# Altium footprint library Package_DFN_QFN.PcbLib: 735 footprints (part 43 of 46)
Each footprint in its own frame and in the unit in brackets; x right, y up, seen from the top. Pads: shape width x height; smd on the part's side, far side on the other; paste and mask are expansions set on the pad; w line width, h text height; cw(c..) or ccw(c..) is an arc to the next point about the centre after c.
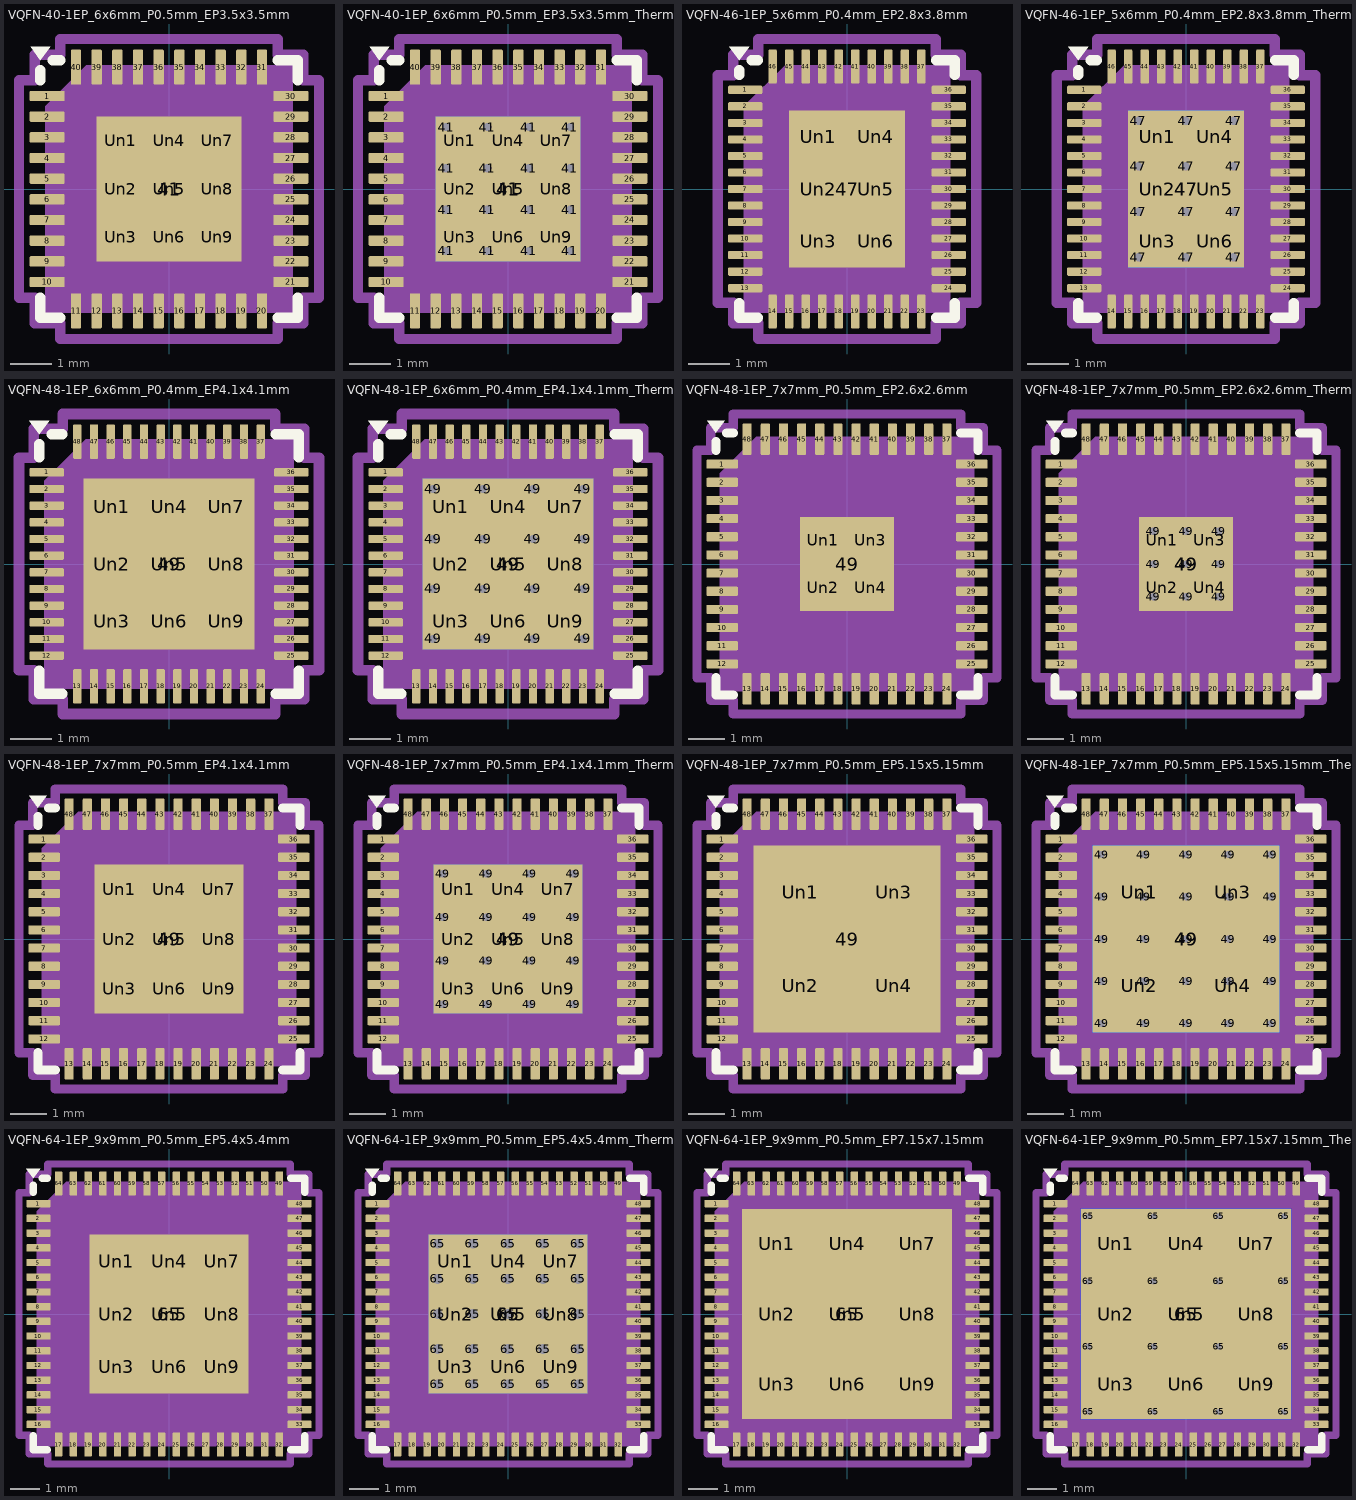
[diagram p42: the footprints below, top view; thin cyan lines are the x and y axes]

## VQFN-40-1EP_6x6mm_P0.5mm_EP3.5x3.5mm [mm] "VQFN-40-1EP_6x6mm_P0.5mm_EP3.5x3.5mm"
pads (50):
  rrect25% 0.85x0.25 smd: 1(-2.95,2.25) 2(-2.95,1.75) 3(-2.95,1.25) 4(-2.95,0.75) 5(-2.95,0.25) 6(-2.95,-0.25) 7(-2.95,-0.75) 8(-2.95,-1.25) 9(-2.95,-1.75) 10(-2.95,-2.25) 21(2.95,-2.25) 22(2.95,-1.75) 23(2.95,-1.25) 24(2.95,-0.75) 25(2.95,-0.25) 26(2.95,0.25) 27(2.95,0.75) 28(2.95,1.25) 29(2.95,1.75) 30(2.95,2.25)
  rrect25% 0.25x0.85 smd: 11(-2.25,-2.95) 12(-1.75,-2.95) 13(-1.25,-2.95) 14(-0.75,-2.95) 15(-0.25,-2.95) 16(0.25,-2.95) 17(0.75,-2.95) 18(1.25,-2.95) 19(1.75,-2.95) 20(2.25,-2.95) 31(2.25,2.95) 32(1.75,2.95) 33(1.25,2.95) 34(0.75,2.95) 35(0.25,2.95) 36(-0.25,2.95) 37(-0.75,2.95) 38(-1.25,2.95) 39(-1.75,2.95) 40(-2.25,2.95)
  rect 3.5x3.5 smd: 41(0,0)
  rrect25% 0.94x0.94 on Top Paste: Un1(-1.17,1.17) Un2(-1.17,0) Un3(-1.17,-1.17) Un4(0,1.17) Un5(0,0) Un6(0,-1.17) Un7(1.17,1.17) Un8(1.17,0) Un9(1.17,-1.17)
F.SilkS:
  region: -3.11,3.11 -3.35,3.44 -2.87,3.44
  lines w0.254: -3.11,-2.635 -3.11,-3.11 -2.635,-3.11 ; -3.11,2.635 -3.11,2.87 ; -2.81,3.11 -2.635,3.11 ; 2.635,-3.11 3.11,-3.11 3.11,-2.635 ; 2.635,3.11 3.11,3.11 3.11,2.635
Top Component Center:
  lines w0.127: -0.127,0 0.127,0 -0.127,0 ; 0,-0.127 0,0.127 0,-0.127
Top Assembly:
  region: 3,-3 -3,-3 -3,2 -2,3 3,3
Top Courtyard:
  lines w0.254: -3.63,-2.63 -3.63,2.63 -3.25,2.63 -3.25,3.25 -2.63,3.25 -2.63,3.63 2.63,3.63 2.63,3.25 3.25,3.25 3.25,2.63 3.63,2.63 3.63,-2.63 3.25,-2.63 3.25,-3.25 2.63,-3.25 2.63,-3.63 -2.63,-3.63 -2.63,-3.25 -3.25,-3.25 -3.25,-2.63 -3.63,-2.63
Top Designator:
  text ".Designator" at -3.43,-0.344 h1.52

## VQFN-40-1EP_6x6mm_P0.5mm_EP3.5x3.5mm_ThermalVias [mm] "VQFN-40-1EP_6x6mm_P0.5mm_EP3.5x3.5mm_ThermalVias"
pads (67):
  rrect25% 0.85x0.25 smd: 1(-2.95,2.25) 2(-2.95,1.75) 3(-2.95,1.25) 4(-2.95,0.75) 5(-2.95,0.25) 6(-2.95,-0.25) 7(-2.95,-0.75) 8(-2.95,-1.25) 9(-2.95,-1.75) 10(-2.95,-2.25) 21(2.95,-2.25) 22(2.95,-1.75) 23(2.95,-1.25) 24(2.95,-0.75) 25(2.95,-0.25) 26(2.95,0.25) 27(2.95,0.75) 28(2.95,1.25) 29(2.95,1.75) 30(2.95,2.25)
  rrect25% 0.25x0.85 smd: 11(-2.25,-2.95) 12(-1.75,-2.95) 13(-1.25,-2.95) 14(-0.75,-2.95) 15(-0.25,-2.95) 16(0.25,-2.95) 17(0.75,-2.95) 18(1.25,-2.95) 19(1.75,-2.95) 20(2.25,-2.95) 31(2.25,2.95) 32(1.75,2.95) 33(1.25,2.95) 34(0.75,2.95) 35(0.25,2.95) 36(-0.25,2.95) 37(-0.75,2.95) 38(-1.25,2.95) 39(-1.75,2.95) 40(-2.25,2.95)
  round 0.5 hole 0.2: 41(-1.5,-1.5) 41(-1.5,-0.5) 41(-1.5,0.5) 41(-1.5,1.5) 41(-0.5,-1.5) 41(-0.5,-0.5) 41(-0.5,0.5) 41(-0.5,1.5) 41(0.5,-1.5) 41(0.5,-0.5) 41(0.5,0.5) 41(0.5,1.5) 41(1.5,-1.5) 41(1.5,-0.5) 41(1.5,0.5) 41(1.5,1.5)
  rect 3.5x3.5 smd: 41(0,0)
  rect 3.5x3.5 smd far side: 41(0,0)
  rrect25% 0.94x0.94 on Top Paste: Un1(-1.17,1.17) Un2(-1.17,0) Un3(-1.17,-1.17) Un4(0,1.17) Un5(0,0) Un6(0,-1.17) Un7(1.17,1.17) Un8(1.17,0) Un9(1.17,-1.17)
F.SilkS:
  region: -3.11,3.11 -3.35,3.44 -2.87,3.44
  lines w0.254: -3.11,-2.635 -3.11,-3.11 -2.635,-3.11 ; -3.11,2.635 -3.11,2.87 ; -2.81,3.11 -2.635,3.11 ; 2.635,-3.11 3.11,-3.11 3.11,-2.635 ; 2.635,3.11 3.11,3.11 3.11,2.635
Top Component Center:
  lines w0.127: -0.127,0 0.127,0 -0.127,0 ; 0,-0.127 0,0.127 0,-0.127
Top Assembly:
  region: 3,-3 -3,-3 -3,2 -2,3 3,3
Top Courtyard:
  lines w0.254: -3.63,-2.63 -3.25,-2.63 -3.25,-3.25 -2.63,-3.25 -2.63,-3.63 2.63,-3.63 2.63,-3.25 3.25,-3.25 3.25,-2.63 3.63,-2.63 3.63,2.63 3.25,2.63 3.25,3.25 2.63,3.25 2.63,3.63 -2.63,3.63 -2.63,3.25 -3.25,3.25 -3.25,2.63 -3.63,2.63 -3.63,-2.63
Top Designator:
  text ".Designator" at -3.43,-0.344 h1.52

## VQFN-46-1EP_5x6mm_P0.4mm_EP2.8x3.8mm [mm] "VQFN-46-1EP_5x6mm_P0.4mm_EP2.8x3.8mm"
pads (53):
  rrect25% 0.825x0.2 smd: 1(-2.462,2.4) 2(-2.462,2) 3(-2.462,1.6) 4(-2.462,1.2) 5(-2.462,0.8) 6(-2.462,0.4) 7(-2.462,0) 8(-2.462,-0.4) 9(-2.462,-0.8) 10(-2.462,-1.2) 11(-2.462,-1.6) 12(-2.462,-2) 13(-2.462,-2.4) 24(2.462,-2.4) 25(2.462,-2) 26(2.462,-1.6) 27(2.462,-1.2) 28(2.462,-0.8) 29(2.462,-0.4) 30(2.462,0) 31(2.462,0.4) 32(2.462,0.8) 33(2.462,1.2) 34(2.462,1.6) 35(2.462,2) 36(2.462,2.4)
  rrect25% 0.2x0.825 smd: 14(-1.8,-2.963) 15(-1.4,-2.963) 16(-1,-2.963) 17(-0.6,-2.963) 18(-0.2,-2.963) 19(0.2,-2.963) 20(0.6,-2.963) 21(1,-2.963) 22(1.4,-2.963) 23(1.8,-2.963) 37(1.8,2.963) 38(1.4,2.963) 39(1,2.963) 40(0.6,2.963) 41(0.2,2.963) 42(-0.2,2.963) 43(-0.6,2.963) 44(-1,2.963) 45(-1.4,2.963) 46(-1.8,2.963)
  rect 2.8x3.8 smd: 47(0,0)
  rrect25% 1.13x1.02 on Top Paste: Un1(-0.7,1.27) Un2(-0.7,0) Un3(-0.7,-1.27) Un4(0.7,1.27) Un5(0.7,0) Un6(0.7,-1.27)
F.SilkS:
  region: -2.61,3.11 -2.85,3.44 -2.37,3.44
  lines w0.254: -2.61,-2.76 -2.61,-3.11 -2.16,-3.11 ; -2.61,2.76 -2.61,2.87 ; -2.31,3.11 -2.16,3.11 ; 2.16,-3.11 2.61,-3.11 2.61,-2.76 ; 2.16,3.11 2.61,3.11 2.61,2.76
Top Component Center:
  lines w0.127: -0.127,0 0.127,0 -0.127,0 ; 0,-0.127 0,0.127 0,-0.127
Top Assembly:
  region: 2.5,-3 -2.5,-3 -2.5,2 -1.5,3 2.5,3
Top Courtyard:
  lines w0.254: -3.13,-2.75 -2.75,-2.75 -2.75,-3.25 -2.15,-3.25 -2.15,-3.63 2.15,-3.63 2.15,-3.25 2.75,-3.25 2.75,-2.75 3.13,-2.75 3.13,2.75 2.75,2.75 2.75,3.25 2.15,3.25 2.15,3.63 -2.15,3.63 -2.15,3.25 -2.75,3.25 -2.75,2.75 -3.13,2.75 -3.13,-2.75
Top Designator:
  text ".Designator" at -3.43,-0.344 h1.52

## VQFN-46-1EP_5x6mm_P0.4mm_EP2.8x3.8mm_ThermalVias [mm] "VQFN-46-1EP_5x6mm_P0.4mm_EP2.8x3.8mm_ThermalVias"
pads (66):
  rrect25% 0.825x0.2 smd: 1(-2.462,2.4) 2(-2.462,2) 3(-2.462,1.6) 4(-2.462,1.2) 5(-2.462,0.8) 6(-2.462,0.4) 7(-2.462,0) 8(-2.462,-0.4) 9(-2.462,-0.8) 10(-2.462,-1.2) 11(-2.462,-1.6) 12(-2.462,-2) 13(-2.462,-2.4) 24(2.462,-2.4) 25(2.462,-2) 26(2.462,-1.6) 27(2.462,-1.2) 28(2.462,-0.8) 29(2.462,-0.4) 30(2.462,0) 31(2.462,0.4) 32(2.462,0.8) 33(2.462,1.2) 34(2.462,1.6) 35(2.462,2) 36(2.462,2.4)
  rrect25% 0.2x0.825 smd: 14(-1.8,-2.963) 15(-1.4,-2.963) 16(-1,-2.963) 17(-0.6,-2.963) 18(-0.2,-2.963) 19(0.2,-2.963) 20(0.6,-2.963) 21(1,-2.963) 22(1.4,-2.963) 23(1.8,-2.963) 37(1.8,2.963) 38(1.4,2.963) 39(1,2.963) 40(0.6,2.963) 41(0.2,2.963) 42(-0.2,2.963) 43(-0.6,2.963) 44(-1,2.963) 45(-1.4,2.963) 46(-1.8,2.963)
  round 0.5 hole 0.2: 47(-1.15,-1.65) 47(-1.15,-0.55) 47(-1.15,0.55) 47(-1.15,1.65) 47(0,-1.65) 47(0,-0.55) 47(0,0.55) 47(0,1.65) 47(1.15,-1.65) 47(1.15,-0.55) 47(1.15,0.55) 47(1.15,1.65)
  rect 2.8x3.8 smd: 47(0,0)
  rect 2.8x3.8 smd far side: 47(0,0)
  rrect23% 1.21x1.1 on Top Paste: Un1(-0.7,1.27) Un2(-0.7,0) Un3(-0.7,-1.27) Un4(0.7,1.27) Un5(0.7,0) Un6(0.7,-1.27)
F.SilkS:
  region: -2.61,3.11 -2.85,3.44 -2.37,3.44
  lines w0.254: -2.61,-2.76 -2.61,-3.11 -2.16,-3.11 ; -2.61,2.76 -2.61,2.87 ; -2.31,3.11 -2.16,3.11 ; 2.16,-3.11 2.61,-3.11 2.61,-2.76 ; 2.16,3.11 2.61,3.11 2.61,2.76
Top Component Center:
  lines w0.127: -0.127,0 0.127,0 -0.127,0 ; 0,-0.127 0,0.127 0,-0.127
Top Assembly:
  region: 2.5,-3 -2.5,-3 -2.5,2 -1.5,3 2.5,3
Top Courtyard:
  lines w0.254: -3.13,-2.75 -2.75,-2.75 -2.75,-3.25 -2.15,-3.25 -2.15,-3.63 2.15,-3.63 2.15,-3.25 2.75,-3.25 2.75,-2.75 3.13,-2.75 3.13,2.75 2.75,2.75 2.75,3.25 2.15,3.25 2.15,3.63 -2.15,3.63 -2.15,3.25 -2.75,3.25 -2.75,2.75 -3.13,2.75 -3.13,-2.75
Top Designator:
  text ".Designator" at -3.43,-0.344 h1.52

## VQFN-48-1EP_6x6mm_P0.4mm_EP4.1x4.1mm [mm] "VQFN-48-1EP_6x6mm_P0.4mm_EP4.1x4.1mm"
pads (58):
  rrect25% 0.825x0.2 smd: 1(-2.937,2.2) 2(-2.937,1.8) 3(-2.937,1.4) 4(-2.937,1) 5(-2.937,0.6) 6(-2.937,0.2) 7(-2.937,-0.2) 8(-2.937,-0.6) 9(-2.937,-1) 10(-2.937,-1.4) 11(-2.937,-1.8) 12(-2.937,-2.2) 25(2.937,-2.2) 26(2.937,-1.8) 27(2.937,-1.4) 28(2.937,-1) 29(2.937,-0.6) 30(2.937,-0.2) 31(2.937,0.2) 32(2.937,0.6) 33(2.937,1) 34(2.937,1.4) 35(2.937,1.8) 36(2.937,2.2)
  rrect25% 0.2x0.825 smd: 13(-2.2,-2.937) 14(-1.8,-2.937) 15(-1.4,-2.937) 16(-1,-2.937) 17(-0.6,-2.937) 18(-0.2,-2.937) 19(0.2,-2.937) 20(0.6,-2.937) 21(1,-2.937) 22(1.4,-2.937) 23(1.8,-2.937) 24(2.2,-2.937) 37(2.2,2.937) 38(1.8,2.937) 39(1.4,2.937) 40(1,2.937) 41(0.6,2.937) 42(0.2,2.937) 43(-0.2,2.937) 44(-0.6,2.937) 45(-1,2.937) 46(-1.4,2.937) 47(-1.8,2.937) 48(-2.2,2.937)
  rect 4.1x4.1 smd: 49(0,0)
  rrect23% 1.1x1.1 on Top Paste: Un1(-1.37,1.37) Un2(-1.37,0) Un3(-1.37,-1.37) Un4(0,1.37) Un5(0,0) Un6(0,-1.37) Un7(1.37,1.37) Un8(1.37,0) Un9(1.37,-1.37)
F.SilkS:
  region: -3.11,3.11 -3.35,3.44 -2.87,3.44
  lines w0.254: -3.11,-2.56 -3.11,-3.11 -2.56,-3.11 ; -3.11,2.56 -3.11,2.87 ; -2.81,3.11 -2.56,3.11 ; 2.56,-3.11 3.11,-3.11 3.11,-2.56 ; 2.56,3.11 3.11,3.11 3.11,2.56
Top Component Center:
  lines w0.127: -0.127,0 0.127,0 -0.127,0 ; 0,-0.127 0,0.127 0,-0.127
Top Assembly:
  region: 3,-3 -3,-3 -3,2 -2,3 3,3
Top Courtyard:
  lines w0.254: -3.6,-2.55 -3.6,2.55 -3.25,2.55 -3.25,3.25 -2.55,3.25 -2.55,3.6 2.55,3.6 2.55,3.25 3.25,3.25 3.25,2.55 3.6,2.55 3.6,-2.55 3.25,-2.55 3.25,-3.25 2.55,-3.25 2.55,-3.6 -2.55,-3.6 -2.55,-3.25 -3.25,-3.25 -3.25,-2.55 -3.6,-2.55
Top Designator:
  text ".Designator" at -3.43,-0.344 h1.52

## VQFN-48-1EP_6x6mm_P0.4mm_EP4.1x4.1mm_ThermalVias [mm] "VQFN-48-1EP_6x6mm_P0.4mm_EP4.1x4.1mm_ThermalVias"
pads (75):
  rrect25% 0.825x0.2 smd: 1(-2.937,2.2) 2(-2.937,1.8) 3(-2.937,1.4) 4(-2.937,1) 5(-2.937,0.6) 6(-2.937,0.2) 7(-2.937,-0.2) 8(-2.937,-0.6) 9(-2.937,-1) 10(-2.937,-1.4) 11(-2.937,-1.8) 12(-2.937,-2.2) 25(2.937,-2.2) 26(2.937,-1.8) 27(2.937,-1.4) 28(2.937,-1) 29(2.937,-0.6) 30(2.937,-0.2) 31(2.937,0.2) 32(2.937,0.6) 33(2.937,1) 34(2.937,1.4) 35(2.937,1.8) 36(2.937,2.2)
  rrect25% 0.2x0.825 smd: 13(-2.2,-2.937) 14(-1.8,-2.937) 15(-1.4,-2.937) 16(-1,-2.937) 17(-0.6,-2.937) 18(-0.2,-2.937) 19(0.2,-2.937) 20(0.6,-2.937) 21(1,-2.937) 22(1.4,-2.937) 23(1.8,-2.937) 24(2.2,-2.937) 37(2.2,2.937) 38(1.8,2.937) 39(1.4,2.937) 40(1,2.937) 41(0.6,2.937) 42(0.2,2.937) 43(-0.2,2.937) 44(-0.6,2.937) 45(-1,2.937) 46(-1.4,2.937) 47(-1.8,2.937) 48(-2.2,2.937)
  round 0.5 hole 0.2: 49(-1.8,-1.8) 49(-1.8,-0.6) 49(-1.8,0.6) 49(-1.8,1.8) 49(-0.6,-1.8) 49(-0.6,-0.6) 49(-0.6,0.6) 49(-0.6,1.8) 49(0.6,-1.8) 49(0.6,-0.6) 49(0.6,0.6) 49(0.6,1.8) 49(1.8,-1.8) 49(1.8,-0.6) 49(1.8,0.6) 49(1.8,1.8)
  rect 4.1x4.1 smd: 49(0,0)
  rect 4.1x4.1 smd far side: 49(0,0)
  rrect23% 1.1x1.1 on Top Paste: Un1(-1.37,1.37) Un2(-1.37,0) Un3(-1.37,-1.37) Un4(0,1.37) Un5(0,0) Un6(0,-1.37) Un7(1.37,1.37) Un8(1.37,0) Un9(1.37,-1.37)
F.SilkS:
  region: -3.11,3.11 -3.35,3.44 -2.87,3.44
  lines w0.254: -3.11,-2.56 -3.11,-3.11 -2.56,-3.11 ; -3.11,2.56 -3.11,2.87 ; -2.81,3.11 -2.56,3.11 ; 2.56,-3.11 3.11,-3.11 3.11,-2.56 ; 2.56,3.11 3.11,3.11 3.11,2.56
Top Component Center:
  lines w0.127: -0.127,0 0.127,0 -0.127,0 ; 0,-0.127 0,0.127 0,-0.127
Top Assembly:
  region: 3,-3 -3,-3 -3,2 -2,3 3,3
Top Courtyard:
  lines w0.254: -3.6,-2.55 -3.25,-2.55 -3.25,-3.25 -2.55,-3.25 -2.55,-3.6 2.55,-3.6 2.55,-3.25 3.25,-3.25 3.25,-2.55 3.6,-2.55 3.6,2.55 3.25,2.55 3.25,3.25 2.55,3.25 2.55,3.6 -2.55,3.6 -2.55,3.25 -3.25,3.25 -3.25,2.55 -3.6,2.55 -3.6,-2.55
Top Designator:
  text ".Designator" at -3.43,-0.344 h1.52

## VQFN-48-1EP_7x7mm_P0.5mm_EP2.6x2.6mm [mm] "VQFN-48-1EP_7x7mm_P0.5mm_EP2.6x2.6mm"
pads (53):
  rrect25% 0.875x0.25 smd: 1(-3.437,2.75) 2(-3.437,2.25) 3(-3.437,1.75) 4(-3.437,1.25) 5(-3.437,0.75) 6(-3.437,0.25) 7(-3.437,-0.25) 8(-3.437,-0.75) 9(-3.437,-1.25) 10(-3.437,-1.75) 11(-3.437,-2.25) 12(-3.437,-2.75) 25(3.437,-2.75) 26(3.437,-2.25) 27(3.437,-1.75) 28(3.437,-1.25) 29(3.437,-0.75) 30(3.437,-0.25) 31(3.437,0.25) 32(3.437,0.75) 33(3.437,1.25) 34(3.437,1.75) 35(3.437,2.25) 36(3.437,2.75)
  rrect25% 0.25x0.875 smd: 13(-2.75,-3.437) 14(-2.25,-3.437) 15(-1.75,-3.437) 16(-1.25,-3.437) 17(-0.75,-3.437) 18(-0.25,-3.437) 19(0.25,-3.437) 20(0.75,-3.437) 21(1.25,-3.437) 22(1.75,-3.437) 23(2.25,-3.437) 24(2.75,-3.437) 37(2.75,3.437) 38(2.25,3.437) 39(1.75,3.437) 40(1.25,3.437) 41(0.75,3.437) 42(0.25,3.437) 43(-0.25,3.437) 44(-0.75,3.437) 45(-1.25,3.437) 46(-1.75,3.437) 47(-2.25,3.437) 48(-2.75,3.437)
  rect 2.6x2.6 smd: 49(0,0)
  rrect24% 1.05x1.05 on Top Paste: Un1(-0.65,0.65) Un2(-0.65,-0.65) Un3(0.65,0.65) Un4(0.65,-0.65)
F.SilkS:
  region: -3.61,3.61 -3.85,3.94 -3.37,3.94
  lines w0.254: -3.61,-3.135 -3.61,-3.61 -3.135,-3.61 ; -3.61,3.135 -3.61,3.37 ; -3.31,3.61 -3.135,3.61 ; 3.135,-3.61 3.61,-3.61 3.61,-3.135 ; 3.135,3.61 3.61,3.61 3.61,3.135
Top Component Center:
  lines w0.127: -0.127,0 0.127,0 -0.127,0 ; 0,-0.127 0,0.127 0,-0.127
Top Assembly:
  region: 3.5,-3.5 -3.5,-3.5 -3.5,2.5 -2.5,3.5 3.5,3.5
Top Courtyard:
  lines w0.254: -4.13,-3.13 -3.75,-3.13 -3.75,-3.75 -3.13,-3.75 -3.13,-4.13 3.13,-4.13 3.13,-3.75 3.75,-3.75 3.75,-3.13 4.13,-3.13 4.13,3.13 3.75,3.13 3.75,3.75 3.13,3.75 3.13,4.13 -3.13,4.13 -3.13,3.75 -3.75,3.75 -3.75,3.13 -4.13,3.13 -4.13,-3.13
Top Designator:
  text ".Designator" at -3.43,-0.344 h1.52
3D body "VQFN-48-1EP_7x7mm_P0.5mm_EP4.1x4.1mm.step": height 1.05, standoff 0, extent -3.5,-3.5 3.5,3.5

## VQFN-48-1EP_7x7mm_P0.5mm_EP2.6x2.6mm_ThermalVias [mm] "VQFN-48-1EP_7x7mm_P0.5mm_EP2.6x2.6mm_ThermalVias"
pads (63):
  rrect25% 0.875x0.25 smd: 1(-3.437,2.75) 2(-3.437,2.25) 3(-3.437,1.75) 4(-3.437,1.25) 5(-3.437,0.75) 6(-3.437,0.25) 7(-3.437,-0.25) 8(-3.437,-0.75) 9(-3.437,-1.25) 10(-3.437,-1.75) 11(-3.437,-2.25) 12(-3.437,-2.75) 25(3.437,-2.75) 26(3.437,-2.25) 27(3.437,-1.75) 28(3.437,-1.25) 29(3.437,-0.75) 30(3.437,-0.25) 31(3.437,0.25) 32(3.437,0.75) 33(3.437,1.25) 34(3.437,1.75) 35(3.437,2.25) 36(3.437,2.75)
  rrect25% 0.25x0.875 smd: 13(-2.75,-3.437) 14(-2.25,-3.437) 15(-1.75,-3.437) 16(-1.25,-3.437) 17(-0.75,-3.437) 18(-0.25,-3.437) 19(0.25,-3.437) 20(0.75,-3.437) 21(1.25,-3.437) 22(1.75,-3.437) 23(2.25,-3.437) 24(2.75,-3.437) 37(2.75,3.437) 38(2.25,3.437) 39(1.75,3.437) 40(1.25,3.437) 41(0.75,3.437) 42(0.25,3.437) 43(-0.25,3.437) 44(-0.75,3.437) 45(-1.25,3.437) 46(-1.75,3.437) 47(-2.25,3.437) 48(-2.75,3.437)
  round 0.5 hole 0.2: 49(-0.9,-0.9) 49(-0.9,0) 49(-0.9,0.9) 49(0,-0.9) 49(0,0) 49(0,0.9) 49(0.9,-0.9) 49(0.9,0) 49(0.9,0.9)
  rect 2.6x2.6 smd: 49(0,0)
  rect 2.3x2.3 smd far side: 49(0,0)
  rrect24% 1.05x1.05 on Top Paste: Un1(-0.65,0.65) Un2(-0.65,-0.65) Un3(0.65,0.65) Un4(0.65,-0.65)
F.SilkS:
  region: -3.61,3.61 -3.85,3.94 -3.37,3.94
  lines w0.254: -3.61,-3.135 -3.61,-3.61 -3.135,-3.61 ; -3.61,3.135 -3.61,3.37 ; -3.31,3.61 -3.135,3.61 ; 3.135,-3.61 3.61,-3.61 3.61,-3.135 ; 3.135,3.61 3.61,3.61 3.61,3.135
Top Component Center:
  lines w0.127: -0.127,0 0.127,0 -0.127,0 ; 0,-0.127 0,0.127 0,-0.127
Top Assembly:
  region: 3.5,-3.5 -3.5,-3.5 -3.5,2.5 -2.5,3.5 3.5,3.5
Top Courtyard:
  lines w0.254: -4.13,-3.13 -3.75,-3.13 -3.75,-3.75 -3.13,-3.75 -3.13,-4.13 3.13,-4.13 3.13,-3.75 3.75,-3.75 3.75,-3.13 4.13,-3.13 4.13,3.13 3.75,3.13 3.75,3.75 3.13,3.75 3.13,4.13 -3.13,4.13 -3.13,3.75 -3.75,3.75 -3.75,3.13 -4.13,3.13 -4.13,-3.13
Top Designator:
  text ".Designator" at -3.43,-0.344 h1.52
3D body "VQFN-48-1EP_7x7mm_P0.5mm_EP4.1x4.1mm.step": height 1.05, standoff 0, extent -3.5,-3.5 3.5,3.5

## VQFN-48-1EP_7x7mm_P0.5mm_EP4.1x4.1mm [mm] "VQFN-48-1EP_7x7mm_P0.5mm_EP4.1x4.1mm"
pads (58):
  rrect25% 0.875x0.25 smd: 1(-3.437,2.75) 2(-3.437,2.25) 3(-3.437,1.75) 4(-3.437,1.25) 5(-3.437,0.75) 6(-3.437,0.25) 7(-3.437,-0.25) 8(-3.437,-0.75) 9(-3.437,-1.25) 10(-3.437,-1.75) 11(-3.437,-2.25) 12(-3.437,-2.75) 25(3.437,-2.75) 26(3.437,-2.25) 27(3.437,-1.75) 28(3.437,-1.25) 29(3.437,-0.75) 30(3.437,-0.25) 31(3.437,0.25) 32(3.437,0.75) 33(3.437,1.25) 34(3.437,1.75) 35(3.437,2.25) 36(3.437,2.75)
  rrect25% 0.25x0.875 smd: 13(-2.75,-3.437) 14(-2.25,-3.437) 15(-1.75,-3.437) 16(-1.25,-3.437) 17(-0.75,-3.437) 18(-0.25,-3.437) 19(0.25,-3.437) 20(0.75,-3.437) 21(1.25,-3.437) 22(1.75,-3.437) 23(2.25,-3.437) 24(2.75,-3.437) 37(2.75,3.437) 38(2.25,3.437) 39(1.75,3.437) 40(1.25,3.437) 41(0.75,3.437) 42(0.25,3.437) 43(-0.25,3.437) 44(-0.75,3.437) 45(-1.25,3.437) 46(-1.75,3.437) 47(-2.25,3.437) 48(-2.75,3.437)
  rect 4.1x4.1 smd: 49(0,0)
  rrect23% 1.1x1.1 on Top Paste: Un1(-1.37,1.37) Un2(-1.37,0) Un3(-1.37,-1.37) Un4(0,1.37) Un5(0,0) Un6(0,-1.37) Un7(1.37,1.37) Un8(1.37,0) Un9(1.37,-1.37)
F.SilkS:
  region: -3.61,3.61 -3.85,3.94 -3.37,3.94
  lines w0.254: -3.61,-3.135 -3.61,-3.61 -3.135,-3.61 ; -3.61,3.135 -3.61,3.37 ; -3.31,3.61 -3.135,3.61 ; 3.135,-3.61 3.61,-3.61 3.61,-3.135 ; 3.135,3.61 3.61,3.61 3.61,3.135
Top Component Center:
  lines w0.127: -0.127,0 0.127,0 -0.127,0 ; 0,-0.127 0,0.127 0,-0.127
Top Assembly:
  region: 3.5,-3.5 -3.5,-3.5 -3.5,2.5 -2.5,3.5 3.5,3.5
Top Courtyard:
  lines w0.254: -4.13,-3.13 -3.75,-3.13 -3.75,-3.75 -3.13,-3.75 -3.13,-4.13 3.13,-4.13 3.13,-3.75 3.75,-3.75 3.75,-3.13 4.13,-3.13 4.13,3.13 3.75,3.13 3.75,3.75 3.13,3.75 3.13,4.13 -3.13,4.13 -3.13,3.75 -3.75,3.75 -3.75,3.13 -4.13,3.13 -4.13,-3.13
Top Designator:
  text ".Designator" at -3.43,-0.344 h1.52
3D body "VQFN-48-1EP_7x7mm_P0.5mm_EP4.1x4.1mm.step": height 1.05, standoff 0, extent -3.5,-3.5 3.5,3.5

## VQFN-48-1EP_7x7mm_P0.5mm_EP4.1x4.1mm_ThermalVias [mm] "VQFN-48-1EP_7x7mm_P0.5mm_EP4.1x4.1mm_ThermalVias"
pads (75):
  rrect25% 0.875x0.25 smd: 1(-3.437,2.75) 2(-3.437,2.25) 3(-3.437,1.75) 4(-3.437,1.25) 5(-3.437,0.75) 6(-3.437,0.25) 7(-3.437,-0.25) 8(-3.437,-0.75) 9(-3.437,-1.25) 10(-3.437,-1.75) 11(-3.437,-2.25) 12(-3.437,-2.75) 25(3.437,-2.75) 26(3.437,-2.25) 27(3.437,-1.75) 28(3.437,-1.25) 29(3.437,-0.75) 30(3.437,-0.25) 31(3.437,0.25) 32(3.437,0.75) 33(3.437,1.25) 34(3.437,1.75) 35(3.437,2.25) 36(3.437,2.75)
  rrect25% 0.25x0.875 smd: 13(-2.75,-3.437) 14(-2.25,-3.437) 15(-1.75,-3.437) 16(-1.25,-3.437) 17(-0.75,-3.437) 18(-0.25,-3.437) 19(0.25,-3.437) 20(0.75,-3.437) 21(1.25,-3.437) 22(1.75,-3.437) 23(2.25,-3.437) 24(2.75,-3.437) 37(2.75,3.437) 38(2.25,3.437) 39(1.75,3.437) 40(1.25,3.437) 41(0.75,3.437) 42(0.25,3.437) 43(-0.25,3.437) 44(-0.75,3.437) 45(-1.25,3.437) 46(-1.75,3.437) 47(-2.25,3.437) 48(-2.75,3.437)
  round 0.5 hole 0.2: 49(-1.8,-1.8) 49(-1.8,-0.6) 49(-1.8,0.6) 49(-1.8,1.8) 49(-0.6,-1.8) 49(-0.6,-0.6) 49(-0.6,0.6) 49(-0.6,1.8) 49(0.6,-1.8) 49(0.6,-0.6) 49(0.6,0.6) 49(0.6,1.8) 49(1.8,-1.8) 49(1.8,-0.6) 49(1.8,0.6) 49(1.8,1.8)
  rect 4.1x4.1 smd: 49(0,0)
  rect 4.1x4.1 smd far side: 49(0,0)
  rrect23% 1.1x1.1 on Top Paste: Un1(-1.37,1.37) Un2(-1.37,0) Un3(-1.37,-1.37) Un4(0,1.37) Un5(0,0) Un6(0,-1.37) Un7(1.37,1.37) Un8(1.37,0) Un9(1.37,-1.37)
F.SilkS:
  region: -3.61,3.61 -3.85,3.94 -3.37,3.94
  lines w0.254: -3.61,-3.135 -3.61,-3.61 -3.135,-3.61 ; -3.61,3.135 -3.61,3.37 ; -3.31,3.61 -3.135,3.61 ; 3.135,-3.61 3.61,-3.61 3.61,-3.135 ; 3.135,3.61 3.61,3.61 3.61,3.135
Top Component Center:
  lines w0.127: -0.127,0 0.127,0 -0.127,0 ; 0,-0.127 0,0.127 0,-0.127
Top Assembly:
  region: 3.5,-3.5 -3.5,-3.5 -3.5,2.5 -2.5,3.5 3.5,3.5
Top Courtyard:
  lines w0.254: -4.13,-3.13 -3.75,-3.13 -3.75,-3.75 -3.13,-3.75 -3.13,-4.13 3.13,-4.13 3.13,-3.75 3.75,-3.75 3.75,-3.13 4.13,-3.13 4.13,3.13 3.75,3.13 3.75,3.75 3.13,3.75 3.13,4.13 -3.13,4.13 -3.13,3.75 -3.75,3.75 -3.75,3.13 -4.13,3.13 -4.13,-3.13
Top Designator:
  text ".Designator" at -3.43,-0.344 h1.52
3D body "VQFN-48-1EP_7x7mm_P0.5mm_EP4.1x4.1mm.step": height 1.05, standoff 0, extent -3.5,-3.5 3.5,3.5

## VQFN-48-1EP_7x7mm_P0.5mm_EP5.15x5.15mm [mm] "VQFN-48-1EP_7x7mm_P0.5mm_EP5.15x5.15mm"
pads (53):
  rrect25% 0.875x0.25 smd: 1(-3.437,2.75) 2(-3.437,2.25) 3(-3.437,1.75) 4(-3.437,1.25) 5(-3.437,0.75) 6(-3.437,0.25) 7(-3.437,-0.25) 8(-3.437,-0.75) 9(-3.437,-1.25) 10(-3.437,-1.75) 11(-3.437,-2.25) 12(-3.437,-2.75) 25(3.437,-2.75) 26(3.437,-2.25) 27(3.437,-1.75) 28(3.437,-1.25) 29(3.437,-0.75) 30(3.437,-0.25) 31(3.437,0.25) 32(3.437,0.75) 33(3.437,1.25) 34(3.437,1.75) 35(3.437,2.25) 36(3.437,2.75)
  rrect25% 0.25x0.875 smd: 13(-2.75,-3.437) 14(-2.25,-3.437) 15(-1.75,-3.437) 16(-1.25,-3.437) 17(-0.75,-3.437) 18(-0.25,-3.437) 19(0.25,-3.437) 20(0.75,-3.437) 21(1.25,-3.437) 22(1.75,-3.437) 23(2.25,-3.437) 24(2.75,-3.437) 37(2.75,3.437) 38(2.25,3.437) 39(1.75,3.437) 40(1.25,3.437) 41(0.75,3.437) 42(0.25,3.437) 43(-0.25,3.437) 44(-0.75,3.437) 45(-1.25,3.437) 46(-1.75,3.437) 47(-2.25,3.437) 48(-2.75,3.437)
  rect 5.15x5.15 smd: 49(0,0)
  rrect12% 2.08x2.08 on Top Paste: Un1(-1.29,1.29) Un2(-1.29,-1.29) Un3(1.29,1.29) Un4(1.29,-1.29)
F.SilkS:
  region: -3.61,3.61 -3.85,3.94 -3.37,3.94
  lines w0.254: -3.61,-3.135 -3.61,-3.61 -3.135,-3.61 ; -3.61,3.135 -3.61,3.37 ; -3.31,3.61 -3.135,3.61 ; 3.135,-3.61 3.61,-3.61 3.61,-3.135 ; 3.135,3.61 3.61,3.61 3.61,3.135
Top Component Center:
  lines w0.127: -0.127,0 0.127,0 -0.127,0 ; 0,-0.127 0,0.127 0,-0.127
Top Assembly:
  region: 3.5,-3.5 -3.5,-3.5 -3.5,2.5 -2.5,3.5 3.5,3.5
Top Courtyard:
  lines w0.254: -4.13,-3.13 -3.75,-3.13 -3.75,-3.75 -3.13,-3.75 -3.13,-4.13 3.13,-4.13 3.13,-3.75 3.75,-3.75 3.75,-3.13 4.13,-3.13 4.13,3.13 3.75,3.13 3.75,3.75 3.13,3.75 3.13,4.13 -3.13,4.13 -3.13,3.75 -3.75,3.75 -3.75,3.13 -4.13,3.13 -4.13,-3.13
Top Designator:
  text ".Designator" at -3.43,-0.344 h1.52
3D body "VQFN-48-1EP_7x7mm_P0.5mm_EP4.1x4.1mm.step": height 1.05, standoff 0, extent -3.5,-3.5 3.5,3.5

## VQFN-48-1EP_7x7mm_P0.5mm_EP5.15x5.15mm_ThermalVias [mm] "VQFN-48-1EP_7x7mm_P0.5mm_EP5.15x5.15mm_ThermalVias"
pads (79):
  rrect25% 0.875x0.25 smd: 1(-3.437,2.75) 2(-3.437,2.25) 3(-3.437,1.75) 4(-3.437,1.25) 5(-3.437,0.75) 6(-3.437,0.25) 7(-3.437,-0.25) 8(-3.437,-0.75) 9(-3.437,-1.25) 10(-3.437,-1.75) 11(-3.437,-2.25) 12(-3.437,-2.75) 25(3.437,-2.75) 26(3.437,-2.25) 27(3.437,-1.75) 28(3.437,-1.25) 29(3.437,-0.75) 30(3.437,-0.25) 31(3.437,0.25) 32(3.437,0.75) 33(3.437,1.25) 34(3.437,1.75) 35(3.437,2.25) 36(3.437,2.75)
  rrect25% 0.25x0.875 smd: 13(-2.75,-3.437) 14(-2.25,-3.437) 15(-1.75,-3.437) 16(-1.25,-3.437) 17(-0.75,-3.437) 18(-0.25,-3.437) 19(0.25,-3.437) 20(0.75,-3.437) 21(1.25,-3.437) 22(1.75,-3.437) 23(2.25,-3.437) 24(2.75,-3.437) 37(2.75,3.437) 38(2.25,3.437) 39(1.75,3.437) 40(1.25,3.437) 41(0.75,3.437) 42(0.25,3.437) 43(-0.25,3.437) 44(-0.75,3.437) 45(-1.25,3.437) 46(-1.75,3.437) 47(-2.25,3.437) 48(-2.75,3.437)
  round 0.5 hole 0.2: 49(-2.325,-2.325) 49(-2.325,-1.162) 49(-2.325,0) 49(-2.325,1.162) 49(-2.325,2.325) 49(-1.162,-2.325) 49(-1.162,-1.162) 49(-1.162,0) 49(-1.162,1.162) 49(-1.162,2.325) 49(0,-2.325) 49(0,-1.162) 49(0,0) 49(0,1.162) 49(0,2.325) 49(1.162,-2.325) 49(1.162,-1.162) 49(1.162,0) 49(1.162,1.162) 49(1.162,2.325) 49(2.325,-2.325) 49(2.325,-1.162) 49(2.325,0) 49(2.325,1.162) 49(2.325,2.325)
  rect 5.15x5.15 smd: 49(0,0)
  rect 5.15x5.15 smd far side: 49(0,0)
  rrect12% 2.08x2.08 on Top Paste: Un1(-1.29,1.29) Un2(-1.29,-1.29) Un3(1.29,1.29) Un4(1.29,-1.29)
F.SilkS:
  region: -3.61,3.61 -3.85,3.94 -3.37,3.94
  lines w0.254: -3.61,-3.135 -3.61,-3.61 -3.135,-3.61 ; -3.61,3.135 -3.61,3.37 ; -3.31,3.61 -3.135,3.61 ; 3.135,-3.61 3.61,-3.61 3.61,-3.135 ; 3.135,3.61 3.61,3.61 3.61,3.135
Top Component Center:
  lines w0.127: -0.127,0 0.127,0 -0.127,0 ; 0,-0.127 0,0.127 0,-0.127
Top Assembly:
  region: 3.5,-3.5 -3.5,-3.5 -3.5,2.5 -2.5,3.5 3.5,3.5
Top Courtyard:
  lines w0.254: -4.13,-3.13 -3.75,-3.13 -3.75,-3.75 -3.13,-3.75 -3.13,-4.13 3.13,-4.13 3.13,-3.75 3.75,-3.75 3.75,-3.13 4.13,-3.13 4.13,3.13 3.75,3.13 3.75,3.75 3.13,3.75 3.13,4.13 -3.13,4.13 -3.13,3.75 -3.75,3.75 -3.75,3.13 -4.13,3.13 -4.13,-3.13
Top Designator:
  text ".Designator" at -3.43,-0.344 h1.52
3D body "VQFN-48-1EP_7x7mm_P0.5mm_EP4.1x4.1mm.step": height 1.05, standoff 0, extent -3.5,-3.5 3.5,3.5

## VQFN-64-1EP_9x9mm_P0.5mm_EP5.4x5.4mm [mm] "VQFN-64-1EP_9x9mm_P0.5mm_EP5.4x5.4mm"
pads (74):
  rrect25% 0.825x0.25 smd: 1(-4.437,3.75) 2(-4.437,3.25) 3(-4.437,2.75) 4(-4.437,2.25) 5(-4.437,1.75) 6(-4.437,1.25) 7(-4.437,0.75) 8(-4.437,0.25) 9(-4.437,-0.25) 10(-4.437,-0.75) 11(-4.437,-1.25) 12(-4.437,-1.75) 13(-4.437,-2.25) 14(-4.437,-2.75) 15(-4.437,-3.25) 16(-4.437,-3.75) 33(4.437,-3.75) 34(4.437,-3.25) 35(4.437,-2.75) 36(4.437,-2.25) 37(4.437,-1.75) 38(4.437,-1.25) 39(4.437,-0.75) 40(4.437,-0.25) 41(4.437,0.25) 42(4.437,0.75) 43(4.437,1.25) 44(4.437,1.75) 45(4.437,2.25) 46(4.437,2.75) 47(4.437,3.25) 48(4.437,3.75)
  rrect25% 0.25x0.825 smd: 17(-3.75,-4.437) 18(-3.25,-4.437) 19(-2.75,-4.437) 20(-2.25,-4.437) 21(-1.75,-4.437) 22(-1.25,-4.437) 23(-0.75,-4.437) 24(-0.25,-4.437) 25(0.25,-4.437) 26(0.75,-4.437) 27(1.25,-4.437) 28(1.75,-4.437) 29(2.25,-4.437) 30(2.75,-4.437) 31(3.25,-4.437) 32(3.75,-4.437) 49(3.75,4.437) 50(3.25,4.437) 51(2.75,4.437) 52(2.25,4.437) 53(1.75,4.437) 54(1.25,4.437) 55(0.75,4.437) 56(0.25,4.437) 57(-0.25,4.437) 58(-0.75,4.437) 59(-1.25,4.437) 60(-1.75,4.437) 61(-2.25,4.437) 62(-2.75,4.437) 63(-3.25,4.437) 64(-3.75,4.437)
  rect 5.4x5.4 smd: 65(0,0)
  rrect17% 1.45x1.45 on Top Paste: Un1(-1.8,1.8) Un2(-1.8,0) Un3(-1.8,-1.8) Un4(0,1.8) Un5(0,0) Un6(0,-1.8) Un7(1.8,1.8) Un8(1.8,0) Un9(1.8,-1.8)
F.SilkS:
  region: -4.61,4.61 -4.85,4.94 -4.37,4.94
  lines w0.254: -4.61,-4.135 -4.61,-4.61 -4.135,-4.61 ; -4.61,4.135 -4.61,4.37 ; -4.31,4.61 -4.135,4.61 ; 4.135,-4.61 4.61,-4.61 4.61,-4.135 ; 4.135,4.61 4.61,4.61 4.61,4.135
Top Component Center:
  lines w0.127: -0.127,0 0.127,0 -0.127,0 ; 0,-0.127 0,0.127 0,-0.127
Top Assembly:
  region: 4.5,-4.5 -4.5,-4.5 -4.5,3.5 -3.5,4.5 4.5,4.5
Top Courtyard:
  lines w0.254: -5.1,-4.13 -4.75,-4.13 -4.75,-4.75 -4.13,-4.75 -4.13,-5.1 4.13,-5.1 4.13,-4.75 4.75,-4.75 4.75,-4.13 5.1,-4.13 5.1,4.13 4.75,4.13 4.75,4.75 4.13,4.75 4.13,5.1 -4.13,5.1 -4.13,4.75 -4.75,4.75 -4.75,4.13 -5.1,4.13 -5.1,-4.13
Top Designator:
  text ".Designator" at -3.43,-0.344 h1.52

## VQFN-64-1EP_9x9mm_P0.5mm_EP5.4x5.4mm_ThermalVias [mm] "VQFN-64-1EP_9x9mm_P0.5mm_EP5.4x5.4mm_ThermalVias"
pads (100):
  rrect25% 0.825x0.25 smd: 1(-4.437,3.75) 2(-4.437,3.25) 3(-4.437,2.75) 4(-4.437,2.25) 5(-4.437,1.75) 6(-4.437,1.25) 7(-4.437,0.75) 8(-4.437,0.25) 9(-4.437,-0.25) 10(-4.437,-0.75) 11(-4.437,-1.25) 12(-4.437,-1.75) 13(-4.437,-2.25) 14(-4.437,-2.75) 15(-4.437,-3.25) 16(-4.437,-3.75) 33(4.437,-3.75) 34(4.437,-3.25) 35(4.437,-2.75) 36(4.437,-2.25) 37(4.437,-1.75) 38(4.437,-1.25) 39(4.437,-0.75) 40(4.437,-0.25) 41(4.437,0.25) 42(4.437,0.75) 43(4.437,1.25) 44(4.437,1.75) 45(4.437,2.25) 46(4.437,2.75) 47(4.437,3.25) 48(4.437,3.75)
  rrect25% 0.25x0.825 smd: 17(-3.75,-4.437) 18(-3.25,-4.437) 19(-2.75,-4.437) 20(-2.25,-4.437) 21(-1.75,-4.437) 22(-1.25,-4.437) 23(-0.75,-4.437) 24(-0.25,-4.437) 25(0.25,-4.437) 26(0.75,-4.437) 27(1.25,-4.437) 28(1.75,-4.437) 29(2.25,-4.437) 30(2.75,-4.437) 31(3.25,-4.437) 32(3.75,-4.437) 49(3.75,4.437) 50(3.25,4.437) 51(2.75,4.437) 52(2.25,4.437) 53(1.75,4.437) 54(1.25,4.437) 55(0.75,4.437) 56(0.25,4.437) 57(-0.25,4.437) 58(-0.75,4.437) 59(-1.25,4.437) 60(-1.75,4.437) 61(-2.25,4.437) 62(-2.75,4.437) 63(-3.25,4.437) 64(-3.75,4.437)
  round 0.63 hole 0.33: 65(-2.385,-2.385) 65(-2.385,-1.192) 65(-2.385,0) 65(-2.385,1.192) 65(-2.385,2.385) 65(-1.192,-2.385) 65(-1.192,-1.192) 65(-1.192,0) 65(-1.192,1.192) 65(-1.192,2.385) 65(0,-2.385) 65(0,-1.192) 65(0,0) 65(0,1.192) 65(0,2.385) 65(1.192,-2.385) 65(1.192,-1.192) 65(1.192,0) 65(1.192,1.192) 65(1.192,2.385) 65(2.385,-2.385) 65(2.385,-1.192) 65(2.385,0) 65(2.385,1.192) 65(2.385,2.385)
  rect 5.4x5.4 smd: 65(0,0)
  rect 5.4x5.4 smd far side: 65(0,0)
  rrect17% 1.45x1.45 on Top Paste: Un1(-1.8,1.8) Un2(-1.8,0) Un3(-1.8,-1.8) Un4(0,1.8) Un5(0,0) Un6(0,-1.8) Un7(1.8,1.8) Un8(1.8,0) Un9(1.8,-1.8)
F.SilkS:
  region: -4.61,4.61 -4.85,4.94 -4.37,4.94
  lines w0.254: -4.61,-4.135 -4.61,-4.61 -4.135,-4.61 ; -4.61,4.135 -4.61,4.37 ; -4.31,4.61 -4.135,4.61 ; 4.135,-4.61 4.61,-4.61 4.61,-4.135 ; 4.135,4.61 4.61,4.61 4.61,4.135
Top Component Center:
  lines w0.127: -0.127,0 0.127,0 -0.127,0 ; 0,-0.127 0,0.127 0,-0.127
Top Assembly:
  region: 4.5,-4.5 -4.5,-4.5 -4.5,3.5 -3.5,4.5 4.5,4.5
Top Courtyard:
  lines w0.254: -5.1,-4.13 -4.75,-4.13 -4.75,-4.75 -4.13,-4.75 -4.13,-5.1 4.13,-5.1 4.13,-4.75 4.75,-4.75 4.75,-4.13 5.1,-4.13 5.1,4.13 4.75,4.13 4.75,4.75 4.13,4.75 4.13,5.1 -4.13,5.1 -4.13,4.75 -4.75,4.75 -4.75,4.13 -5.1,4.13 -5.1,-4.13
Top Designator:
  text ".Designator" at -3.43,-0.344 h1.52

## VQFN-64-1EP_9x9mm_P0.5mm_EP7.15x7.15mm [mm] "VQFN-64-1EP_9x9mm_P0.5mm_EP7.15x7.15mm"
pads (74):
  rrect25% 0.825x0.25 smd: 1(-4.437,3.75) 2(-4.437,3.25) 3(-4.437,2.75) 4(-4.437,2.25) 5(-4.437,1.75) 6(-4.437,1.25) 7(-4.437,0.75) 8(-4.437,0.25) 9(-4.437,-0.25) 10(-4.437,-0.75) 11(-4.437,-1.25) 12(-4.437,-1.75) 13(-4.437,-2.25) 14(-4.437,-2.75) 15(-4.437,-3.25) 16(-4.437,-3.75) 33(4.437,-3.75) 34(4.437,-3.25) 35(4.437,-2.75) 36(4.437,-2.25) 37(4.437,-1.75) 38(4.437,-1.25) 39(4.437,-0.75) 40(4.437,-0.25) 41(4.437,0.25) 42(4.437,0.75) 43(4.437,1.25) 44(4.437,1.75) 45(4.437,2.25) 46(4.437,2.75) 47(4.437,3.25) 48(4.437,3.75)
  rrect25% 0.25x0.825 smd: 17(-3.75,-4.437) 18(-3.25,-4.437) 19(-2.75,-4.437) 20(-2.25,-4.437) 21(-1.75,-4.437) 22(-1.25,-4.437) 23(-0.75,-4.437) 24(-0.25,-4.437) 25(0.25,-4.437) 26(0.75,-4.437) 27(1.25,-4.437) 28(1.75,-4.437) 29(2.25,-4.437) 30(2.75,-4.437) 31(3.25,-4.437) 32(3.75,-4.437) 49(3.75,4.437) 50(3.25,4.437) 51(2.75,4.437) 52(2.25,4.437) 53(1.75,4.437) 54(1.25,4.437) 55(0.75,4.437) 56(0.25,4.437) 57(-0.25,4.437) 58(-0.75,4.437) 59(-1.25,4.437) 60(-1.75,4.437) 61(-2.25,4.437) 62(-2.75,4.437) 63(-3.25,4.437) 64(-3.75,4.437)
  rect 7.15x7.15 smd: 65(0,0)
  rrect13% 1.92x1.92 on Top Paste: Un1(-2.38,2.38) Un2(-2.38,0) Un3(-2.38,-2.38) Un4(0,2.38) Un5(0,0) Un6(0,-2.38) Un7(2.38,2.38) Un8(2.38,0) Un9(2.38,-2.38)
F.SilkS:
  region: -4.61,4.61 -4.85,4.94 -4.37,4.94
  lines w0.254: -4.61,-4.135 -4.61,-4.61 -4.135,-4.61 ; -4.61,4.135 -4.61,4.37 ; -4.31,4.61 -4.135,4.61 ; 4.135,-4.61 4.61,-4.61 4.61,-4.135 ; 4.135,4.61 4.61,4.61 4.61,4.135
Top Component Center:
  lines w0.127: -0.127,0 0.127,0 -0.127,0 ; 0,-0.127 0,0.127 0,-0.127
Top Assembly:
  region: 4.5,-4.5 -4.5,-4.5 -4.5,3.5 -3.5,4.5 4.5,4.5
Top Courtyard:
  lines w0.254: -5.1,-4.13 -4.75,-4.13 -4.75,-4.75 -4.13,-4.75 -4.13,-5.1 4.13,-5.1 4.13,-4.75 4.75,-4.75 4.75,-4.13 5.1,-4.13 5.1,4.13 4.75,4.13 4.75,4.75 4.13,4.75 4.13,5.1 -4.13,5.1 -4.13,4.75 -4.75,4.75 -4.75,4.13 -5.1,4.13 -5.1,-4.13
Top Designator:
  text ".Designator" at -3.43,-0.344 h1.52

## VQFN-64-1EP_9x9mm_P0.5mm_EP7.15x7.15mm_ThermalVias [mm] "VQFN-64-1EP_9x9mm_P0.5mm_EP7.15x7.15mm_ThermalVias"
pads (91):
  rrect25% 0.825x0.25 smd: 1(-4.437,3.75) 2(-4.437,3.25) 3(-4.437,2.75) 4(-4.437,2.25) 5(-4.437,1.75) 6(-4.437,1.25) 7(-4.437,0.75) 8(-4.437,0.25) 9(-4.437,-0.25) 10(-4.437,-0.75) 11(-4.437,-1.25) 12(-4.437,-1.75) 13(-4.437,-2.25) 14(-4.437,-2.75) 15(-4.437,-3.25) 16(-4.437,-3.75) 33(4.437,-3.75) 34(4.437,-3.25) 35(4.437,-2.75) 36(4.437,-2.25) 37(4.437,-1.75) 38(4.437,-1.25) 39(4.437,-0.75) 40(4.437,-0.25) 41(4.437,0.25) 42(4.437,0.75) 43(4.437,1.25) 44(4.437,1.75) 45(4.437,2.25) 46(4.437,2.75) 47(4.437,3.25) 48(4.437,3.75)
  rrect25% 0.25x0.825 smd: 17(-3.75,-4.437) 18(-3.25,-4.437) 19(-2.75,-4.437) 20(-2.25,-4.437) 21(-1.75,-4.437) 22(-1.25,-4.437) 23(-0.75,-4.437) 24(-0.25,-4.437) 25(0.25,-4.437) 26(0.75,-4.437) 27(1.25,-4.437) 28(1.75,-4.437) 29(2.25,-4.437) 30(2.75,-4.437) 31(3.25,-4.437) 32(3.75,-4.437) 49(3.75,4.437) 50(3.25,4.437) 51(2.75,4.437) 52(2.25,4.437) 53(1.75,4.437) 54(1.25,4.437) 55(0.75,4.437) 56(0.25,4.437) 57(-0.25,4.437) 58(-0.75,4.437) 59(-1.25,4.437) 60(-1.75,4.437) 61(-2.25,4.437) 62(-2.75,4.437) 63(-3.25,4.437) 64(-3.75,4.437)
  round 0.5 hole 0.2: 65(-3.325,-3.325) 65(-3.325,-1.108) 65(-3.325,1.108) 65(-3.325,3.325) 65(-1.108,-3.325) 65(-1.108,-1.108) 65(-1.108,1.108) 65(-1.108,3.325) 65(1.108,-3.325) 65(1.108,-1.108) 65(1.108,1.108) 65(1.108,3.325) 65(3.325,-3.325) 65(3.325,-1.108) 65(3.325,1.108) 65(3.325,3.325)
  rect 7.15x7.15 smd: 65(0,0)
  rect 7.15x7.15 smd far side: 65(0,0)
  rrect13% 1.92x1.92 on Top Paste: Un1(-2.38,2.38) Un2(-2.38,0) Un3(-2.38,-2.38) Un4(0,2.38) Un5(0,0) Un6(0,-2.38) Un7(2.38,2.38) Un8(2.38,0) Un9(2.38,-2.38)
F.SilkS:
  region: -4.61,4.61 -4.85,4.94 -4.37,4.94
  lines w0.254: -4.61,-4.135 -4.61,-4.61 -4.135,-4.61 ; -4.61,4.135 -4.61,4.37 ; -4.31,4.61 -4.135,4.61 ; 4.135,-4.61 4.61,-4.61 4.61,-4.135 ; 4.135,4.61 4.61,4.61 4.61,4.135
Top Component Center:
  lines w0.127: -0.127,0 0.127,0 -0.127,0 ; 0,-0.127 0,0.127 0,-0.127
Top Assembly:
  region: 4.5,-4.5 -4.5,-4.5 -4.5,3.5 -3.5,4.5 4.5,4.5
Top Courtyard:
  lines w0.254: -5.1,-4.13 -4.75,-4.13 -4.75,-4.75 -4.13,-4.75 -4.13,-5.1 4.13,-5.1 4.13,-4.75 4.75,-4.75 4.75,-4.13 5.1,-4.13 5.1,4.13 4.75,4.13 4.75,4.75 4.13,4.75 4.13,5.1 -4.13,5.1 -4.13,4.75 -4.75,4.75 -4.75,4.13 -5.1,4.13 -5.1,-4.13
Top Designator:
  text ".Designator" at -3.43,-0.344 h1.52